# Altium footprint library HeatSink.PcbLib: 3 footprints
Each footprint in its own frame and in the unit in brackets; x right, y up, seen from the top. Pads: shape width x height; smd on the part's side, far side on the other; paste and mask are expansions set on the pad; w line width, h text height; cw(c..) or ccw(c..) is an arc to the next point about the centre after c.
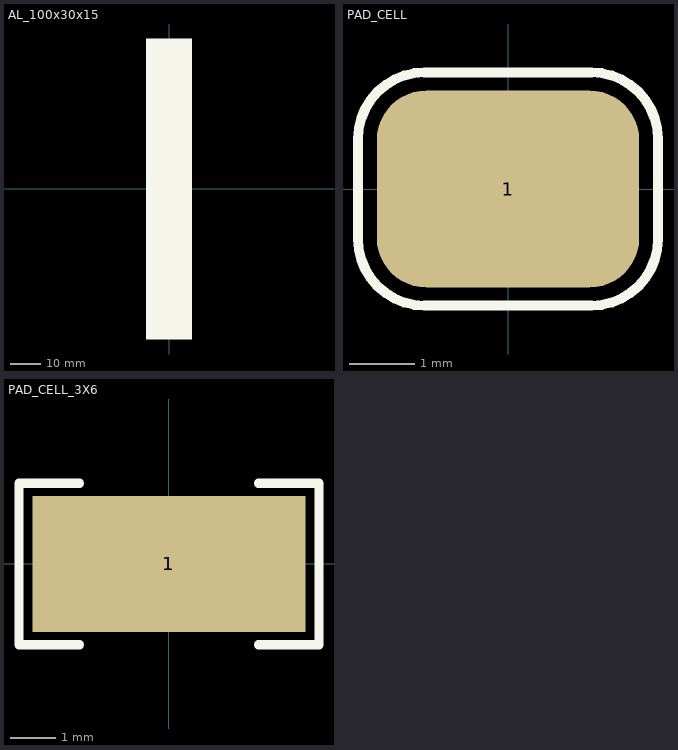
[diagram p0: the footprints below, top view; thin cyan lines are the x and y axes]

## AL_100x30x15 [mm]
Top Overlay:
  region: -7.5,-50 7.5,-50 7.5,50 -7.5,50
Mechanical 15:
  text ".Designator" at 0.677,-7.307 h3
3D body "AL_100x30x15.SLDPRT": height 30.1, standoff 0.1, extent -7.498,-50 7.498,50

## PAD_CELL [mm]
pads (1):
  rrect50% 4x3 smd: 1(0,0)
Top Overlay:
  lines w0.15: -2.286,0 ccw(c-2.286,0) -2.286,0 ; -2.286,0 -2.286,0.762 cw(c-1.27,0.762) -1.27,1.778 0,1.778 1.27,1.778 cw(c1.27,0.762) 2.286,0.762 2.286,0 ; -2.286,0 -2.286,-0.762 ccw(c-1.27,-0.762) -1.27,-1.778 0,-1.778 1.27,-1.778 ccw(c1.27,-0.762) 2.286,-0.762 2.286,0 ; 2.286,0 ccw(c2.286,0) 2.286,0
3D body "PAD.STEP": height 0.3, standoff 0, extent -2,-1.5 2,1.5

## PAD_CELL_3X6 [mm]
pads (1):
  rect 6x3 smd: 1(0,0)
Top Overlay:
  lines w0.2: -1.968,-1.778 -3.302,-1.778 -3.302,1.778 -1.968,1.778 ; 1.968,-1.778 3.302,-1.778 3.302,1.778 1.968,1.778
3D body "PAD_3X6.STEP": height 0.3, standoff 0, extent -3,-1.5 3,1.5